# Altium footprint library Connector-MX.PcbLib: 66 footprints (part 5 of 5)
Each footprint in its own frame and in the unit in brackets; x right, y up, seen from the top. Pads: shape width x height; smd on the part's side, far side on the other; paste and mask are expansions set on the pad; w line width, h text height; cw(c..) or ccw(c..) is an arc to the next point about the centre after c.
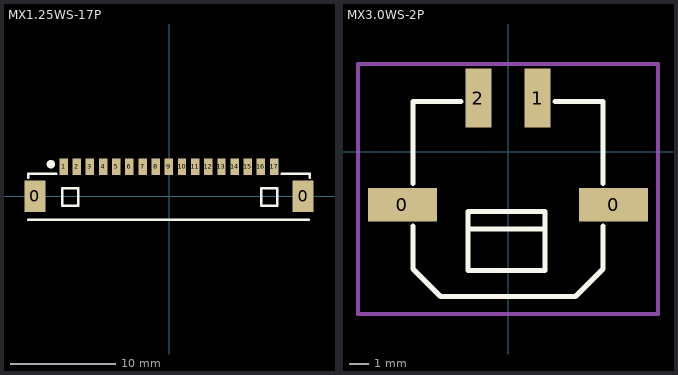
[diagram p4: the footprints below, top view; thin cyan lines are the x and y axes]

## MX1.25WS-17P [mm]
pads (19):
  rect 2x3 smd: 0(-12.757,0) 0(12.757,0)
  rect 0.8x1.6 smd: 1(-10.014,2.811) 2(-8.764,2.811) 3(-7.514,2.811) 4(-6.264,2.811) 5(-5.014,2.811) 6(-3.764,2.811) 7(-2.514,2.811) 8(-1.264,2.811) 9(-0.014,2.811) 10(1.236,2.811) 11(2.486,2.811) 12(3.736,2.811) 13(4.986,2.811) 14(6.236,2.811) 15(7.486,2.811) 16(8.736,2.811) 17(9.986,2.811)
Top Overlay:
  circle w0.4: c-11.233,3.048 r0.2
  lines w0.254: -13.392,1.778 -13.392,2.134 -10.725,2.134 ; -13.365,-2.228 13.292,-2.228 ; 10.725,2.134 13.392,2.134 13.392,1.778 ; -10.141,-0.889 -8.617,-0.889 -8.617,0.762 -10.141,0.762 -10.141,-0.889 ; 8.769,-0.889 10.293,-0.889 10.293,0.762 8.769,0.762 8.769,-0.889
3D body "MX 1.25-WS-17P.STEP": height 3.4, standoff 0, extent -13.208,-2.189 13.192,3.001

## MX3.0WS-2P [mm] "CONN-SMD_2P-H-P3.00-R_X3025WRS-02D-LPSW"
pads (4):
  rect 3.5x1.7 smd: 0(-5.36,-2.715) 0(5.36,-2.715)
  rect 1.3x3 smd: 1(1.5,2.715) 2(-1.5,2.715)
Top Overlay:
  lines w0.254: -4.83,-3.796 -4.83,-5.965 -3.429,-7.366 3.429,-7.366 4.83,-5.965 4.83,-3.796 ; -4.83,-1.634 -4.83,2.54 -2.381,2.54 ; -2.031,-3.948 1.868,-3.948 ; 2.381,2.54 4.83,2.54 4.83,-1.634 ; -2.032,-6.048 1.868,-6.048 ; -2.032,-6.048 1.868,-6.048 ; -2.032,-6.048 1.868,-6.048 ; -2.032,-6.048 -2.032,-3.048 ; -2.032,-3.048 1.868,-3.048 ; -2.032,-3.048 1.868,-3.048 ; -2.032,-3.048 1.868,-3.048 ; 1.868,-6.048 1.868,-3.048 ; 1.868,-6.048 1.868,-3.048 ; 1.868,-6.048 1.868,-3.048
Top Component Outline:
  lines w0.2: -7.62,-8.255 7.62,-8.255 7.62,4.445 -7.62,4.445 -7.62,-8.255
Top Value:
  text "'.Comment'" at -4.314,-0.581 h2
Top Designator:
  text "'.Designator'" at -8.465,-0.629 h3
Top Courtyard:
  lines w0.2: -7.62,-8.255 -7.62,4.445 7.62,4.445 7.62,-8.255 -7.62,-8.255
3D body "X3025WRS-02D-LPSW.stp": height 5.54, standoff 0, extent -6.098,-7.364 6.098,3.937